# Altium footprint library LED_PCB_Large_Custom.PcbLib: 1 footprints
Each footprint in its own frame and in the unit in brackets; x right, y up, seen from the top. Pads: shape width x height; smd on the part's side, far side on the other; paste and mask are expansions set on the pad; w line width, h text height; cw(c..) or ccw(c..) is an arc to the next point about the centre after c.
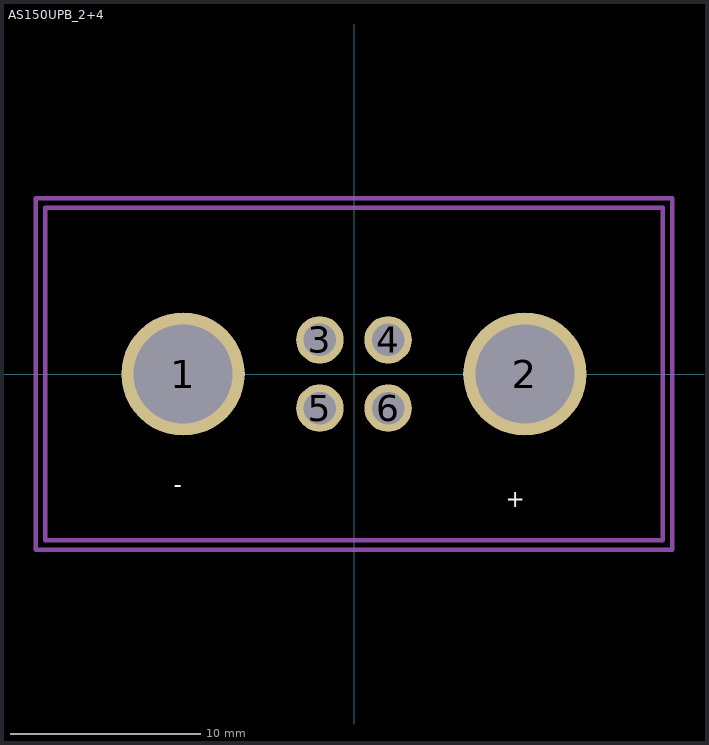
[diagram p0: the footprint, top view; thin cyan lines are the x and y axes]

## AS150UPB_2+4 [mm]
pads (6):
  round 6.5 hole 5.2: 1(-9,0) 2(9,0)
  round 2.5 hole 1.7: 3(-1.8,1.8) 4(1.8,1.8) 5(-1.8,-1.8) 6(1.8,-1.8)
F.SilkS:
  text "-" at -9.5,-6.552 h1.5
  text "+" at 8,-7.294 h1.5
F.CrtYd:
  lines w0.254: -16.75,-9.25 -16.75,9.25 16.75,9.25 16.75,-9.25 -16.75,-9.25
F.Fab:
  lines w0.254: -16.25,-8.75 -16.25,8.75 16.25,8.75 16.25,-8.75 -16.25,-8.75
  text "'.Designator'" at -1.436,-2.898 h1